# Altium footprint library UCP.PcbLib: 222 footprints (part 11 of 14)
Each footprint in its own frame and in the unit in brackets; x right, y up, seen from the top. Pads: shape width x height; smd on the part's side, far side on the other; paste and mask are expansions set on the pad; w line width, h text height; cw(c..) or ccw(c..) is an arc to the next point about the centre after c.
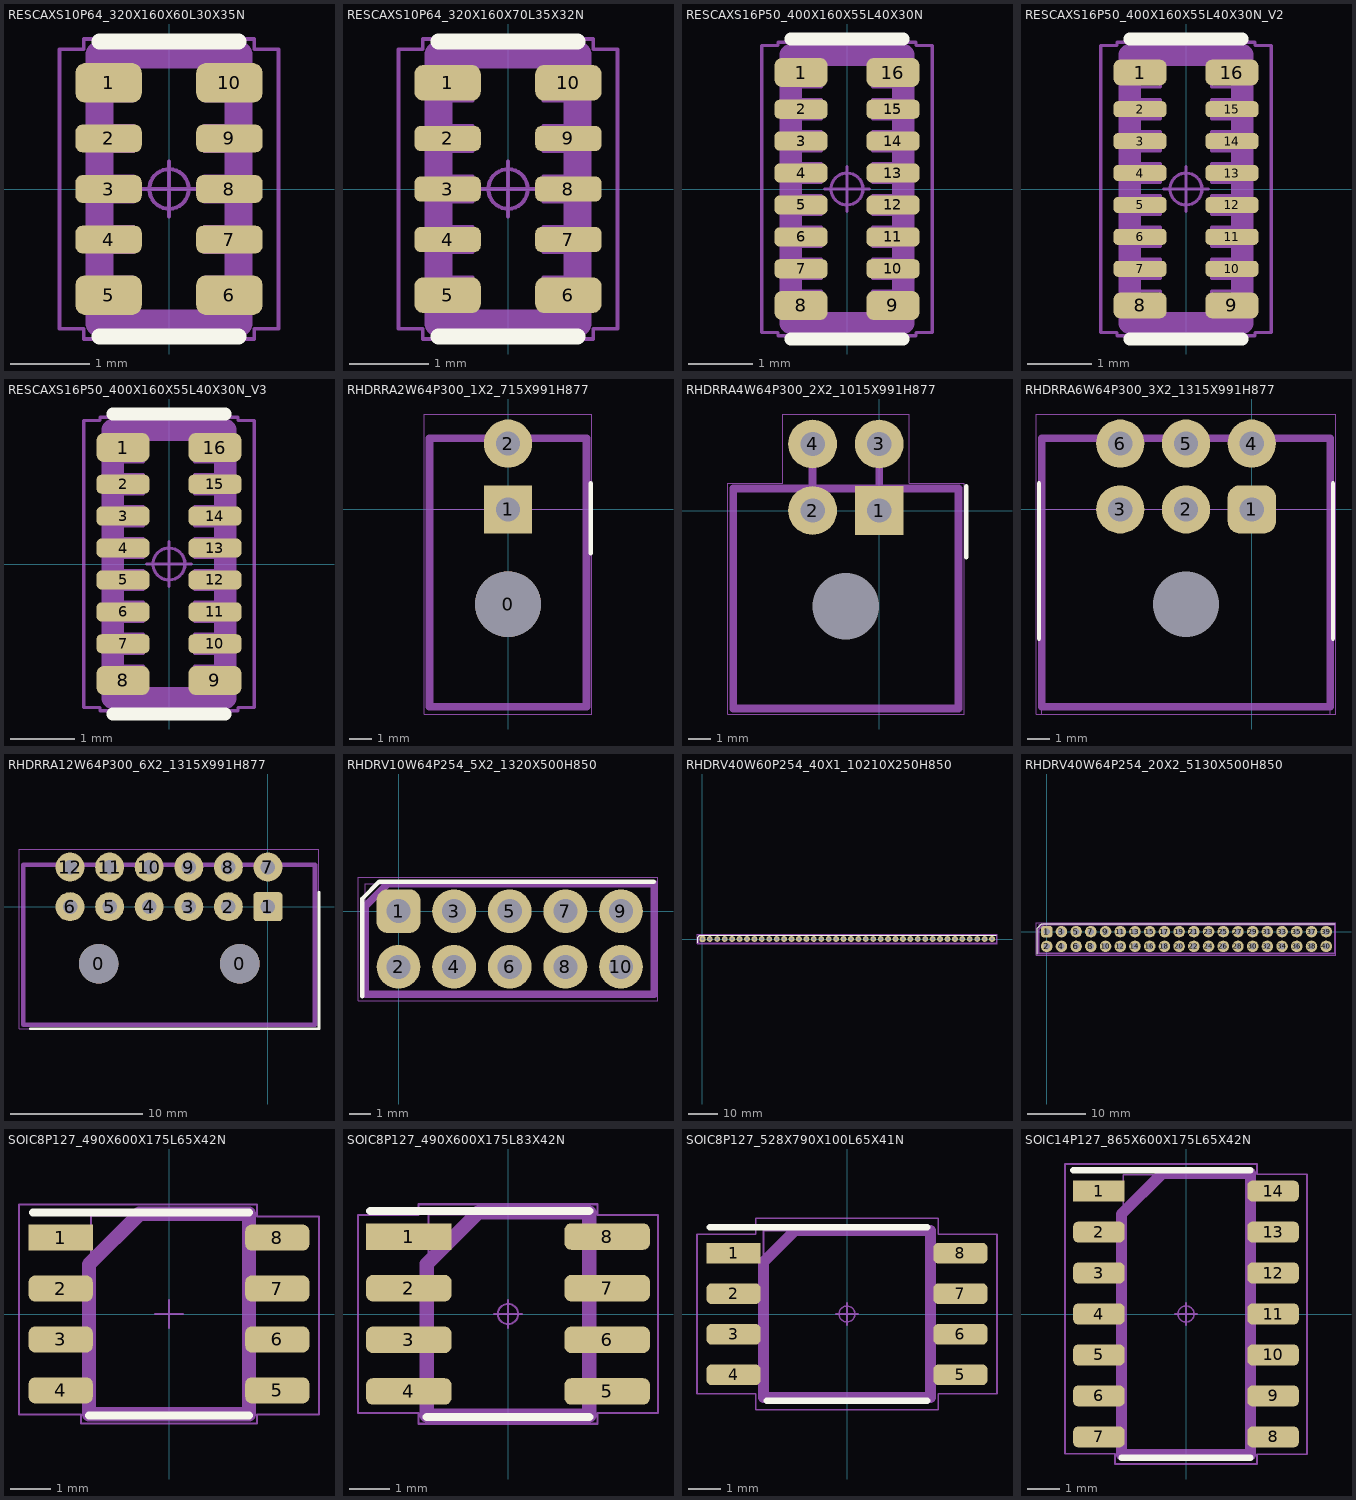
[diagram p10: the footprints below, top view; thin cyan lines are the x and y axes]

## RESCAXS10P64_320X160X60L30X35N [mm] "Resistor, Chip Array, 2 Side Convex, 0.64 mm pitch; 10 pin, 3.20 mm L X 1.60 mm W X 0.50 mm H body"
height 0.6
pads (10):
  rrect49% 0.84x0.5 smd: 1(-0.765,1.345) 5(-0.765,-1.345) 6(0.765,-1.345) 10(0.765,1.345)
  rrect50% 0.84x0.35 smd: 2(-0.765,0.64) 3(-0.765,0) 4(-0.765,-0.64) 7(0.765,-0.64) 8(0.765,0) 9(0.765,0.64)
Top Overlay:
  lines w0.2: -0.88,-1.87 0.88,-1.87 ; -0.88,1.87 0.88,1.87
Top Designator:
  text ".Designator" at 0,0 h1.2
Top Assembly:
  lines w0.35: -0.88,-1.7 -0.88,1.7 0.88,1.7 0.88,-1.7 -0.88,-1.7
Top Courtyard:
  circle w0.05: c0,0 r0.25
  lines w0.05: -0.35,0 0.35,0 ; 0,-0.35 0,0.35 ; -1.385,-1.77 -1.385,1.77 -1.08,1.77 -1.08,1.9 1.08,1.9 1.08,1.77 1.385,1.77 1.385,-1.77 1.08,-1.77 1.08,-1.9 -1.08,-1.9 -1.08,-1.77 -1.385,-1.77
Top Component Outline:
  lines w0.05: -0.8,-1.6 -0.8,1.6 0.8,1.6 0.8,-1.6 -0.8,-1.6
Top Component Terminal:
  lines w0.05: -0.8,-1.57 -0.45,-1.57 -0.45,-1.12 -0.8,-1.12 -0.8,-1.57 ; -0.8,-0.8 -0.45,-0.8 -0.45,-0.48 -0.8,-0.48 -0.8,-0.8 ; -0.8,-0.16 -0.45,-0.16 -0.45,0.16 -0.8,0.16 -0.8,-0.16 ; -0.8,0.48 -0.45,0.48 -0.45,0.8 -0.8,0.8 -0.8,0.48 ; -0.8,1.12 -0.45,1.12 -0.45,1.57 -0.8,1.57 -0.8,1.12 ; 0.45,-1.57 0.45,-1.12 0.8,-1.12 0.8,-1.57 0.45,-1.57 ; 0.45,-0.8 0.45,-0.48 0.8,-0.48 0.8,-0.8 0.45,-0.8 ; 0.45,-0.16 0.45,0.16 0.8,0.16 0.8,-0.16 0.45,-0.16 ; 0.45,0.48 0.45,0.8 0.8,0.8 0.8,0.48 0.45,0.48 ; 0.45,1.12 0.45,1.57 0.8,1.57 0.8,1.12 0.45,1.12
3D body "RESCAXS10P64_320X160X70L35X32.STEP": height 0.7, standoff 0, extent -0.85,-1.6 0.85,1.6

## RESCAXS10P64_320X160X70L35X32N [mm] "Resistor, Chip Array, 2 Side Convex, 0.64 mm pitch; 10 pin, 3.20 mm L X 1.60 mm W X 0.70 mm H body"
height 0.7
pads (10):
  rrect49% 0.84x0.45 smd: 1(-0.765,1.345) 5(-0.765,-1.345) 6(0.765,-1.345) 10(0.765,1.345)
  rrect50% 0.84x0.32 smd: 2(-0.765,0.64) 3(-0.765,0) 4(-0.765,-0.64) 7(0.765,-0.64) 8(0.765,0) 9(0.765,0.64)
Top Overlay:
  lines w0.2: -0.88,-1.87 0.88,-1.87 ; -0.88,1.87 0.88,1.87
Top Designator:
  text ".Designator" at 0,0 h1.2
Top Assembly:
  lines w0.35: -0.88,-1.7 0.88,-1.7 0.88,1.7 -0.88,1.7 -0.88,-1.7
Top Courtyard:
  circle w0.05: c0,0 r0.25
  lines w0.05: -0.35,0 0.35,0 ; 0,-0.35 0,0.35 ; -1.385,-1.77 -1.08,-1.77 -1.08,-1.9 1.08,-1.9 1.08,-1.77 1.385,-1.77 1.385,1.77 1.08,1.77 1.08,1.9 -1.08,1.9 -1.08,1.77 -1.385,1.77 -1.385,-1.77
Top Component Outline:
  lines w0.05: -0.8,-1.6 0.8,-1.6 0.8,1.6 -0.8,1.6 -0.8,-1.6
Top Component Terminal:
  lines w0.05: -0.8,-1.57 -0.8,-1.12 -0.45,-1.12 -0.45,-1.57 -0.8,-1.57 ; -0.8,-0.8 -0.8,-0.48 -0.45,-0.48 -0.45,-0.8 -0.8,-0.8 ; -0.8,-0.16 -0.8,0.16 -0.45,0.16 -0.45,-0.16 -0.8,-0.16 ; -0.8,0.48 -0.8,0.8 -0.45,0.8 -0.45,0.48 -0.8,0.48 ; -0.8,1.12 -0.8,1.57 -0.45,1.57 -0.45,1.12 -0.8,1.12 ; 0.45,-1.57 0.8,-1.57 0.8,-1.12 0.45,-1.12 0.45,-1.57 ; 0.45,-0.8 0.8,-0.8 0.8,-0.48 0.45,-0.48 0.45,-0.8 ; 0.45,-0.16 0.8,-0.16 0.8,0.16 0.45,0.16 0.45,-0.16 ; 0.45,0.48 0.8,0.48 0.8,0.8 0.45,0.8 0.45,0.48 ; 0.45,1.12 0.8,1.12 0.8,1.57 0.45,1.57 0.45,1.12
3D body "RESCAXS10P64_320X160X70L35X32.STEP": height 0.7, standoff 0, extent -0.85,-1.6 0.85,1.6

## RESCAXS16P50_400X160X55L40X30N [mm] "Resistor, Chip Array, 2 Side Convex, 0.50 mm pitch; 16 pin, 4.00 mm L X 1.60 mm W X 0.55 mm H body"
height 0.55
pads (16):
  rrect49% 0.83x0.45 smd mask+0: 1(-0.72,1.825) 8(-0.72,-1.825) 9(0.72,-1.825) 16(0.72,1.825)
  rrect53% 0.83x0.3 smd mask+0: 2(-0.72,1.25) 3(-0.72,0.75) 4(-0.72,0.25) 5(-0.72,-0.25) 6(-0.72,-0.75) 7(-0.72,-1.25) 10(0.72,-1.25) 11(0.72,-0.75) 12(0.72,-0.25) 13(0.72,0.25) 14(0.72,0.75) 15(0.72,1.25)
Top Overlay:
  lines w0.2: -0.88,-2.35 0.88,-2.35 ; -0.88,2.35 0.88,2.35
Top Solder:
  region: 1.05,2.1 0.4,2.1 0.37,2.1 0.315,2.077 0.273,2.035 0.25,1.98 0.25,1.95 0.25,-1.95 0.25,-1.98 0.273,-2.035 0.315,-2.077 0.37,-2.1 0.4,-2.1 1.05,-2.1 1.08,-2.1 1.135,-2.077 1.177,-2.035 1.2,-1.98 1.2,-1.95 1.2,1.95 1.2,1.98 1.177,2.035 1.135,2.077 1.08,2.1
  region: -1.05,2.1 -0.4,2.1 -0.37,2.1 -0.315,2.077 -0.273,2.035 -0.25,1.98 -0.25,1.95 -0.25,-1.95 -0.25,-1.98 -0.273,-2.035 -0.315,-2.077 -0.37,-2.1 -0.4,-2.1 -1.05,-2.1 -1.08,-2.1 -1.135,-2.077 -1.177,-2.035 -1.2,-1.98 -1.2,-1.95 -1.2,1.95 -1.2,1.98 -1.177,2.035 -1.135,2.077 -1.08,2.1
Top Designator:
  text ".Designator" at 0,0 h1.2
Top Assembly:
  lines w0.35: -0.88,-2.1 -0.88,2.1 0.88,2.1 0.88,-2.1 -0.88,-2.1
Top Courtyard:
  circle w0.05: c0,0 r0.25
  lines w0.05: -0.35,0 0.35,0 ; 0,-0.35 0,0.35 ; -1.335,-2.25 -1.335,2.25 -1.08,2.25 -1.08,2.3 1.08,2.3 1.08,2.25 1.335,2.25 1.335,-2.25 1.08,-2.25 1.08,-2.3 -1.08,-2.3 -1.08,-2.25 -1.335,-2.25
Top Component Outline:
  lines w0.05: -0.8,-2 -0.8,2 0.8,2 0.8,-2 -0.8,-2
Top Component Terminal:
  lines w0.05: -0.8,-2.05 -0.4,-2.05 -0.4,-1.6 -0.8,-1.6 -0.8,-2.05 ; -0.8,-1.4 -0.4,-1.4 -0.4,-1.1 -0.8,-1.1 -0.8,-1.4 ; -0.8,-0.9 -0.4,-0.9 -0.4,-0.6 -0.8,-0.6 -0.8,-0.9 ; -0.8,-0.4 -0.4,-0.4 -0.4,-0.1 -0.8,-0.1 -0.8,-0.4 ; -0.8,0.1 -0.4,0.1 -0.4,0.4 -0.8,0.4 -0.8,0.1 ; -0.8,0.6 -0.4,0.6 -0.4,0.9 -0.8,0.9 -0.8,0.6 ; -0.8,1.1 -0.4,1.1 -0.4,1.4 -0.8,1.4 -0.8,1.1 ; -0.8,1.6 -0.4,1.6 -0.4,2.05 -0.8,2.05 -0.8,1.6 ; 0.4,-2.05 0.4,-1.6 0.8,-1.6 0.8,-2.05 0.4,-2.05 ; 0.4,-1.4 0.4,-1.1 0.8,-1.1 0.8,-1.4 0.4,-1.4 ; 0.4,-0.9 0.4,-0.6 0.8,-0.6 0.8,-0.9 0.4,-0.9 ; 0.4,-0.4 0.4,-0.1 0.8,-0.1 0.8,-0.4 0.4,-0.4 ; 0.4,0.1 0.4,0.4 0.8,0.4 0.8,0.1 0.4,0.1 ; 0.4,0.6 0.4,0.9 0.8,0.9 0.8,0.6 0.4,0.6 ; 0.4,1.1 0.4,1.4 0.8,1.4 0.8,1.1 0.4,1.1 ; 0.4,1.6 0.4,2.05 0.8,2.05 0.8,1.6 0.4,1.6
3D body "RESCAXS16P50_400X160X55L40X30.STEP": height 0.55, standoff 0, extent -0.85,-2.05 0.85,2.05

## RESCAXS16P50_400X160X55L40X30N_V2 [mm] "Resistor, Chip Array, 2 Side Convex, 0.50 mm pitch; 16 pin, 4.00 mm L X 1.60 mm W X 0.55 mm H body"
height 0.55
pads (16):
  rrect49% 0.83x0.4 smd mask+0.05: 1(-0.72,1.825) 8(-0.72,-1.825) 9(0.72,-1.825) 16(0.72,1.825)
  rrect53% 0.83x0.25 smd mask+0.05: 2(-0.72,1.25) 3(-0.72,0.75) 4(-0.72,0.25) 5(-0.72,-0.25) 6(-0.72,-0.75) 7(-0.72,-1.25) 10(0.72,-1.25) 11(0.72,-0.75) 12(0.72,-0.25) 13(0.72,0.25) 14(0.72,0.75) 15(0.72,1.25)
Top Overlay:
  lines w0.2: -0.88,-2.35 0.88,-2.35 ; -0.88,2.35 0.88,2.35
Top Designator:
  text ".Designator" at 0,0 h1.2
Top Assembly:
  lines w0.35: -0.88,-2.1 -0.88,2.1 0.88,2.1 0.88,-2.1 -0.88,-2.1
Top Courtyard:
  circle w0.05: c0,0 r0.25
  lines w0.05: -0.35,0 0.35,0 ; 0,-0.35 0,0.35 ; -1.335,-2.25 -1.335,2.25 -1.08,2.25 -1.08,2.3 1.08,2.3 1.08,2.25 1.335,2.25 1.335,-2.25 1.08,-2.25 1.08,-2.3 -1.08,-2.3 -1.08,-2.25 -1.335,-2.25
Top Component Outline:
  lines w0.05: -0.8,-2 -0.8,2 0.8,2 0.8,-2 -0.8,-2
Top Component Terminal:
  lines w0.05: -0.8,-2.05 -0.4,-2.05 -0.4,-1.6 -0.8,-1.6 -0.8,-2.05 ; -0.8,-1.4 -0.4,-1.4 -0.4,-1.1 -0.8,-1.1 -0.8,-1.4 ; -0.8,-0.9 -0.4,-0.9 -0.4,-0.6 -0.8,-0.6 -0.8,-0.9 ; -0.8,-0.4 -0.4,-0.4 -0.4,-0.1 -0.8,-0.1 -0.8,-0.4 ; -0.8,0.1 -0.4,0.1 -0.4,0.4 -0.8,0.4 -0.8,0.1 ; -0.8,0.6 -0.4,0.6 -0.4,0.9 -0.8,0.9 -0.8,0.6 ; -0.8,1.1 -0.4,1.1 -0.4,1.4 -0.8,1.4 -0.8,1.1 ; -0.8,1.6 -0.4,1.6 -0.4,2.05 -0.8,2.05 -0.8,1.6 ; 0.4,-2.05 0.4,-1.6 0.8,-1.6 0.8,-2.05 0.4,-2.05 ; 0.4,-1.4 0.4,-1.1 0.8,-1.1 0.8,-1.4 0.4,-1.4 ; 0.4,-0.9 0.4,-0.6 0.8,-0.6 0.8,-0.9 0.4,-0.9 ; 0.4,-0.4 0.4,-0.1 0.8,-0.1 0.8,-0.4 0.4,-0.4 ; 0.4,0.1 0.4,0.4 0.8,0.4 0.8,0.1 0.4,0.1 ; 0.4,0.6 0.4,0.9 0.8,0.9 0.8,0.6 0.4,0.6 ; 0.4,1.1 0.4,1.4 0.8,1.4 0.8,1.1 0.4,1.1 ; 0.4,1.6 0.4,2.05 0.8,2.05 0.8,1.6 0.4,1.6
3D body "RESCAXS16P50_400X160X55L40X30.STEP": height 0.55, standoff 0, extent -0.85,-2.05 0.85,2.05

## RESCAXS16P50_400X160X55L40X30N_V3 [mm] "Resistor, Chip Array, 2 Side Convex, 0.50 mm pitch; 16 pin, 4.00 mm L X 1.60 mm W X 0.55 mm H body"
height 0.55
pads (16):
  rrect49% 0.83x0.45 smd mask+0.05: 1(-0.72,1.825) 8(-0.72,-1.825) 9(0.72,-1.825) 16(0.72,1.825)
  rrect53% 0.83x0.3 smd mask+0.05: 2(-0.72,1.25) 3(-0.72,0.75) 4(-0.72,0.25) 5(-0.72,-0.25) 6(-0.72,-0.75) 7(-0.72,-1.25) 10(0.72,-1.25) 11(0.72,-0.75) 12(0.72,-0.25) 13(0.72,0.25) 14(0.72,0.75) 15(0.72,1.25)
Top Overlay:
  lines w0.2: -0.88,-2.35 0.88,-2.35 ; -0.88,2.35 0.88,2.35
Top Designator:
  text ".Designator" at 0,0 h1.2
Top Assembly:
  lines w0.35: -0.88,-2.1 -0.88,2.1 0.88,2.1 0.88,-2.1 -0.88,-2.1
Top Courtyard:
  circle w0.05: c0,0 r0.25
  lines w0.05: -0.35,0 0.35,0 ; 0,-0.35 0,0.35 ; -1.335,-2.25 -1.335,2.25 -1.08,2.25 -1.08,2.3 1.08,2.3 1.08,2.25 1.335,2.25 1.335,-2.25 1.08,-2.25 1.08,-2.3 -1.08,-2.3 -1.08,-2.25 -1.335,-2.25
Top Component Outline:
  lines w0.05: -0.8,-2 -0.8,2 0.8,2 0.8,-2 -0.8,-2
Top Component Terminal:
  lines w0.05: -0.8,-2.05 -0.4,-2.05 -0.4,-1.6 -0.8,-1.6 -0.8,-2.05 ; -0.8,-1.4 -0.4,-1.4 -0.4,-1.1 -0.8,-1.1 -0.8,-1.4 ; -0.8,-0.9 -0.4,-0.9 -0.4,-0.6 -0.8,-0.6 -0.8,-0.9 ; -0.8,-0.4 -0.4,-0.4 -0.4,-0.1 -0.8,-0.1 -0.8,-0.4 ; -0.8,0.1 -0.4,0.1 -0.4,0.4 -0.8,0.4 -0.8,0.1 ; -0.8,0.6 -0.4,0.6 -0.4,0.9 -0.8,0.9 -0.8,0.6 ; -0.8,1.1 -0.4,1.1 -0.4,1.4 -0.8,1.4 -0.8,1.1 ; -0.8,1.6 -0.4,1.6 -0.4,2.05 -0.8,2.05 -0.8,1.6 ; 0.4,-2.05 0.4,-1.6 0.8,-1.6 0.8,-2.05 0.4,-2.05 ; 0.4,-1.4 0.4,-1.1 0.8,-1.1 0.8,-1.4 0.4,-1.4 ; 0.4,-0.9 0.4,-0.6 0.8,-0.6 0.8,-0.9 0.4,-0.9 ; 0.4,-0.4 0.4,-0.1 0.8,-0.1 0.8,-0.4 0.4,-0.4 ; 0.4,0.1 0.4,0.4 0.8,0.4 0.8,0.1 0.4,0.1 ; 0.4,0.6 0.4,0.9 0.8,0.9 0.8,0.6 0.4,0.6 ; 0.4,1.1 0.4,1.4 0.8,1.4 0.8,1.1 0.4,1.1 ; 0.4,1.6 0.4,2.05 0.8,2.05 0.8,1.6 0.4,1.6
3D body "RESCAXS16P50_400X160X55L40X30.STEP": height 0.55, standoff 0, extent -0.85,-2.05 0.85,2.05

## RHDRRA2W64P300_1X2_715X991H877 [mm] "Header, Right Angle Receptacle, 3.00 mm pitch; 0.64 mm lead width, 2 pins, 2 rows, 1 pins per row, 7.15mm L X 9.91 mm W X 8.77 mm H body"
height 8.77
pads (3):
  round 3 hole 3 unplated mask+0.25: 0(0,-4.32)
  rect 2.2x2.2 / inner round 2.2 / far side round 2.2 hole 1.1 paste-2.2: 1(0,0)
  round 2.2 hole 1.1 paste-2.2: 2(0,3)
Top Overlay:
  lines w0.2: 3.775,-2 3.775,1.2
Top Designator:
  text ".Designator" at 0,0 h1.2
Top Assembly:
  lines w0.35: -3.575,-9 -3.575,3.25 3.575,3.25 3.575,-9 -3.575,-9
Top Courtyard:
  lines w0.05: -3.825,-9.325 3.825,-9.325 3.825,4.35 -3.825,4.35 -3.825,-9.325
Top Component Outline:
  lines w0.05: -3.575,-9 3.575,-9 3.575,0 -3.575,0 -3.575,-9
Top Component Terminal:
  lines w0.05: -0.32,-0.32 -0.32,0.32 0.32,0.32 0.32,-0.32 -0.32,-0.32 ; -0.32,2.68 -0.32,3.32 0.32,3.32 0.32,2.68 -0.32,2.68
3D body "43045-0200_PA.stp": height 8.77, standoff -3.18, extent -3.575,-8.92 3.575,3.32

## RHDRRA4W64P300_2X2_1015X991H877 [mm] "Header, Right Angle Receptacle, 3.00 mm pitch; 0.64 mm lead width, 4 pins, 2 rows, 2 pins per row, 7.15mm L X 9.91 mm W X 8.77 mm H body"
height 8.77
pads (5):
  round 0 hole 3 unplated mask+0.25: 0(-1.5,-4.32)
  rect 2.2x2.2 / inner round 2.2 / far side round 2.2 hole 1.1 paste-2.2: 1(0,0)
  round 2.2 hole 1.1 paste-2.2: 2(-3,0) 3(0,3) 4(-3,3)
Top Overlay:
  lines w0.2: 3.925,-2.1 3.925,1.1
Top Designator:
  text ".Designator" at 0,0 h1.2
Top Assembly:
  lines w0.35: -3,0.99 -3,3 ; 0,0.99 0,3 ; -6.575,-8.92 3.575,-8.92 3.575,0.99 -6.575,0.99 -6.575,-8.92
Top Courtyard:
  lines w0.05: -4.35,4.346 -4.35,1.24 -6.825,1.24 -6.825,-9.17 3.825,-9.17 3.825,1.24 1.35,1.24 1.35,4.346 ; -4.35,4.35 1.346,4.35
Top Component Outline:
  lines w0.05: -6.575,-8.92 -6.575,0.99 3.575,0.99 3.575,-8.92 2.075,-8.92 -6.575,-8.92
Top Component Terminal:
  lines w0.05: -3.32,-0.32 -2.68,-0.32 -2.68,0.32 -3.32,0.32 -3.32,-0.32 ; -3.32,2.68 -2.68,2.68 -2.68,3.32 -3.32,3.32 -3.32,2.68 ; -0.32,-0.32 0.32,-0.32 0.32,0.32 -0.32,0.32 -0.32,-0.32 ; -0.32,2.68 0.32,2.68 0.32,3.32 -0.32,3.32 -0.32,2.68
3D body "RHDRRA4W64P300_2X2_1015X991H877.stp": height 8.77, standoff -3.18, extent -6.575,-8.92 3.575,3.32

## RHDRRA6W64P300_3X2_1315X991H877 [mm] "Header, Right Angle Receptacle, 3.00 mm pitch; 0.64 mm lead width, 6 pins, 2 rows, 3 pins per row, 13.15 mm L X 9.91 mm W X 8.77 mm H body"
height 8.77
pads (7):
  round 0 hole 3 unplated mask+0.25: 0(-3,-4.32)
  rrect50% 2.2x2.2 hole 1.1 paste-2.2: 1(0,0)
  round 2.2 hole 1.1 paste-2.2: 2(-3,0) 3(-6,0) 4(0,3) 5(-3,3) 6(-6,3)
Top Overlay:
  lines w0.2: -9.7,-5.9 -9.7,1.2 ; 3.7,-5.9 3.7,1.2
Top Designator:
  text ".Designator" at 0,0 h1.2
Top Assembly:
  lines w0.35: -9.58,-9 3.58,-9 3.58,3.25 -9.58,3.25 -9.58,-9
Top Courtyard:
  circle w0.05: c0,0 r0.25
  lines w0.05: -0.35,0 0.35,0 ; 0,-0.35 0,0.35 ; -9.83,-9.325 3.83,-9.325 3.83,4.35 -9.83,4.35 -9.83,-9.325
Top Component Outline:
  lines w0.05: -9.575,-9.325 3.575,-9.325 3.575,0 -9.575,0 -9.575,-9.325
Top Component Terminal:
  lines w0.05: -6.32,-0.32 -5.68,-0.32 -5.68,0.32 -6.32,0.32 -6.32,-0.32 ; -6.32,2.68 -5.68,2.68 -5.68,3.32 -6.32,3.32 -6.32,2.68 ; -3.32,-0.32 -2.68,-0.32 -2.68,0.32 -3.32,0.32 -3.32,-0.32 ; -3.32,2.68 -2.68,2.68 -2.68,3.32 -3.32,3.32 -3.32,2.68 ; -0.32,-0.32 0.32,-0.32 0.32,0.32 -0.32,0.32 -0.32,-0.32 ; -0.32,2.68 0.32,2.68 0.32,3.32 -0.32,3.32 -0.32,2.68
3D body "MOLEX_430450600.stp": height 8.77, standoff -3.18, extent -9.575,-8.92 3.575,3.32

## RHDRRA12W64P300_6X2_1315X991H877 [mm] "Header, Right Angle Receptacle, 3.00 mm pitch; 0.64 mm lead width, 12 pins, 2 rows, 6 pins per row, 13.15 mm L X 9.91 mm W X 8.77 mm H body"
height 8.77
pads (14):
  round 3 hole 3 unplated mask+0.25: 0(-12.84,-4.32) 0(-2.14,-4.32)
  rrect23% 2.2x2.2 / inner round 2.2 / far side rrect23% 2.2x2.2 hole 1.1 paste-2.2: 1(0,0)
  round 2.2 hole 1.1 paste-2.2: 2(-3,0) 3(-6,0) 4(-9,0) 5(-12,0) 6(-15,0) 7(0,3) 8(-3,3) 9(-6,3) 10(-9,3) 11(-12,3) 12(-15,3)
Top Overlay:
  lines w0.2: -18,-9.25 3.875,-9.25 3.875,1.099
Top Designator:
  text ".Designator" at 0,0 h1.2
Top Assembly:
  lines w0.35: -18.55,-8.95 3.575,-8.95 3.575,3.175 -18.55,3.175 -18.55,-8.95
Top Courtyard:
  circle w0.05: c0,0 r0.25
  lines w0.05: -0.35,0 0.35,0 ; 0,-0.35 0,0.35 ; -18.875,-9.25 3.875,-9.25 3.875,4.35 -18.875,4.35 -18.875,-9.25
Top Component Outline:
  lines w0.05: -18.875,-9.25 3.875,-9.25 3.875,4.35 -18.875,4.35 -18.875,-9.25
Top Component Terminal:
  lines w0.05: -15.32,-0.32 -14.68,-0.32 -14.68,0.32 -15.32,0.32 -15.32,-0.32 ; -15.32,2.68 -14.68,2.68 -14.68,3.32 -15.32,3.32 -15.32,2.68 ; -12.32,-0.32 -11.68,-0.32 -11.68,0.32 -12.32,0.32 -12.32,-0.32 ; -12.32,2.68 -11.68,2.68 -11.68,3.32 -12.32,3.32 -12.32,2.68 ; -9.32,-0.32 -8.68,-0.32 -8.68,0.32 -9.32,0.32 -9.32,-0.32 ; -9.32,2.68 -8.68,2.68 -8.68,3.32 -9.32,3.32 -9.32,2.68 ; -6.32,-0.32 -5.68,-0.32 -5.68,0.32 -6.32,0.32 -6.32,-0.32 ; -6.32,2.68 -5.68,2.68 -5.68,3.32 -6.32,3.32 -6.32,2.68 ; -3.32,-0.32 -2.68,-0.32 -2.68,0.32 -3.32,0.32 -3.32,-0.32 ; -3.32,2.68 -2.68,2.68 -2.68,3.32 -3.32,3.32 -3.32,2.68 ; -0.32,-0.32 0.32,-0.32 0.32,0.32 -0.32,0.32 -0.32,-0.32 ; -0.32,2.68 0.32,2.68 0.32,3.32 -0.32,3.32 -0.32,2.68
3D body "430451200.stp": height 8.83, standoff -3.12, extent -18.575,-8.955 3.575,3.285

## RHDRV10W64P254_5X2_1320X500H850 [mm] "Header, Vertical Receptacle, 2.54 mm pitch; 0.64 mm lead width, 10 pins, 2 row, 5 pins per row, 13.20 mm L X 5.00 mm W X 8.50 mm H body"
height 8.5
pads (10):
  rrect50% 2x2 hole 1.1 paste-1.65: 1(0,0)
  round 2 hole 1.1 paste-1.65: 2(0,-2.54) 3(2.54,0) 4(2.54,-2.54) 5(5.08,0) 6(5.08,-2.54) 7(7.62,0) 8(7.62,-2.54) 9(10.16,0) 10(10.16,-2.54)
Top Overlay:
  lines w0.2: -1.65,-3.89 -1.65,0.575 -0.875,1.35 11.65,1.35
Top Designator:
  text ".Designator" at -4.511,-0.453 h2
Top Assembly:
  lines w0.35: -1.52,-3.79 11.68,-3.79 11.68,1.25 -0.5,1.25 -1.52,0.23 -1.52,-3.79
Top Courtyard:
  lines w0.05: -0.35,0 0.35,0 ; 0,-0.35 0,0.35 ; -1.85,-4.09 11.85,-4.09 11.85,1.55 -1.85,1.55 -1.85,-4.09
Top Component Outline:
  lines w0.025: -1.52,-3.79 -1.52,-0.28 -1.52,1.25 -1.25,1.25 11.68,1.25 11.68,-3.79 -1.25,-3.79 -1.52,-3.79
Top Component Terminal:
  lines w0.025: -0.3,-2.74 -0.3,-2.34 0.3,-2.34 0.3,-2.74 -0.3,-2.74 ; -0.3,-0.2 -0.3,0.2 0.3,0.2 0.3,-0.2 -0.3,-0.2 ; 2.24,-2.74 2.24,-2.34 2.84,-2.34 2.84,-2.74 2.24,-2.74 ; 2.24,-0.2 2.24,0.2 2.84,0.2 2.84,-0.2 2.24,-0.2 ; 4.78,-2.74 4.78,-2.34 5.38,-2.34 5.38,-2.74 4.78,-2.74 ; 4.78,-0.2 4.78,0.2 5.38,0.2 5.38,-0.2 4.78,-0.2 ; 7.32,-2.74 7.32,-2.34 7.92,-2.34 7.92,-2.74 7.32,-2.74 ; 7.32,-0.2 7.32,0.2 7.92,0.2 7.92,-0.2 7.32,-0.2 ; 9.86,-2.74 9.86,-2.34 10.46,-2.34 10.46,-2.74 9.86,-2.74 ; 9.86,-0.2 9.86,0.2 10.46,0.2 10.46,-0.2 9.86,-0.2
3D body "RHDRV10W64P254_5X2_1320X500H850.stp": height 8.5, standoff -3, extent -1.52,-3.75 11.68,1.25

## RHDRV40W60P254_40X1_10210X250H850 [mm] "Header, Vertical Receptacle, 2.54 mm pitch; 0.60 mm lead width, 40 pins, 1 row, 40 pins per row, 102.10 mm L X 2.50 mm W X 8.50 mm H body"
height 8.5
pads (40):
  rrect50% 2x2 hole 1.1 paste-1.65: 1(0,0)
  round 2 hole 1.1 paste-1.65: 2(2.54,0) 3(5.08,0) 4(7.62,0) 5(10.16,0) 6(12.7,0) 7(15.24,0) 8(17.78,0) 9(20.32,0) 10(22.86,0) 11(25.4,0) 12(27.94,0) 13(30.48,0) 14(33.02,0) 15(35.56,0) 16(38.1,0) 17(40.64,0) 18(43.18,0) 19(45.72,0) 20(48.26,0) 21(50.8,0) 22(53.34,0) 23(55.88,0) 24(58.42,0) 25(60.96,0) 26(63.5,0) 27(66.04,0) 28(68.58,0) 29(71.12,0) 30(73.66,0) 31(76.2,0) 32(78.74,0) 33(81.28,0) 34(83.82,0) 35(86.36,0) 36(88.9,0) 37(91.44,0) 38(93.98,0) 39(96.52,0) 40(99.06,0)
Top Overlay:
  lines w0.2: -1.65,-1.35 -1.65,0.575 -0.875,1.35 100.55,1.35
Top Designator:
  text ".Designator" at -4.511,-0.453 h2
Top Assembly:
  lines w0.35: -1.52,-1.25 100.58,-1.25 100.58,1.25 -0.5,1.25 -1.52,0.23 -1.52,-1.25
Top Courtyard:
  lines w0.05: -0.35,0 0.35,0 ; 0,-0.35 0,0.35 ; -1.85,-1.55 100.75,-1.55 100.75,1.55 -1.85,1.55 -1.85,-1.55
Top Component Outline:
  lines w0.025: -1.25,-1.25 100.58,-1.25 100.58,1.25 -1.25,1.25 -1.25,-1.25
Top Component Terminal:
  drawing of 160 lines, arcs and shapes, not listed
3D body "RHDRV40W60P254_40X1_10210X250H850.stp": height 8.5, standoff -3, extent -1.52,-1.25 100.58,1.25

## RHDRV40W64P254_20X2_5130X500H850 [mm] "Header, Vertical Receptacle, 2.54 mm pitch; 0.64 mm lead width, 40 pins, 2 row, 20 pins per row, 51.30 mm L X 5.00 mm W X 8.50 mm H body"
height 8.5
pads (40):
  rrect50% 2x2 hole 1.1 paste-1.65: 1(0,0)
  round 2 hole 1.1 paste-1.65: 2(0,-2.54) 3(2.54,0) 4(2.54,-2.54) 5(5.08,0) 6(5.08,-2.54) 7(7.62,0) 8(7.62,-2.54) 9(10.16,0) 10(10.16,-2.54) 11(12.7,0) 12(12.7,-2.54) 13(15.24,0) 14(15.24,-2.54) 15(17.78,0) 16(17.78,-2.54) 17(20.32,0) 18(20.32,-2.54) 19(22.86,0) 20(22.86,-2.54) 21(25.4,0) 22(25.4,-2.54) 23(27.94,0) 24(27.94,-2.54) 25(30.48,0) 26(30.48,-2.54) 27(33.02,0) 28(33.02,-2.54) 29(35.56,0) 30(35.56,-2.54) 31(38.1,0) 32(38.1,-2.54) 33(40.64,0) 34(40.64,-2.54) 35(43.18,0) 36(43.18,-2.54) 37(45.72,0) 38(45.72,-2.54) 39(48.26,0) 40(48.26,-2.54)
Top Overlay:
  lines w0.2: -1.65,-3.89 -1.65,0.575 -0.875,1.35 49.75,1.35
Top Designator:
  text ".Designator" at -4.511,-0.453 h2
Top Assembly:
  lines w0.35: 49.78,1.25 49.78,-3.79 -1.52,-3.79 -1.52,0.23 -0.5,1.25 49.788,1.25
Top Courtyard:
  lines w0.05: -0.35,0 0.35,0 ; 0,-0.35 0,0.35 ; -1.85,-4.09 -1.85,1.55 49.95,1.55 49.95,-4.09 -1.85,-4.09
Top Component Outline:
  lines w0.025: 49.78,1.21 49.78,-3.79 -1.25,-3.79 -1.25,1.25 49.78,1.25
Top Component Terminal:
  drawing of 160 lines, arcs and shapes, not listed
3D body "RHDRV40W60P254_20X2_5130X500H850.stp": height 8.5, standoff -3, extent -1.52,-3.75 49.78,1.25

## SOIC8P127_490X600X175L65X42N [mm] "Small Outline IC (SOIC), 1.27 mm pitch; 8 pin, 4.905 mm L X 3.90 mm W X 1.75 mm H body"
height 1.75
pads (8):
  rect 1.6x0.65 smd: 1(-2.7,1.905)
  rrect49% 1.6x0.65 smd: 2(-2.7,0.635) 3(-2.7,-0.635) 4(-2.7,-1.905) 5(2.7,-1.905) 6(2.7,-0.635) 7(2.7,0.635) 8(2.7,1.905)
Top Overlay:
  lines w0.2: -3.39,2.53 -2,2.53 2,2.53 ; -2,-2.53 2,-2.53
Top Designator:
  text ".Designator" at 0,0 h1.2
Top Assembly:
  lines w0.35: -2,-2.5 -2,1.23 -0.73,2.5 2,2.5 2,-2.5 -2,-2.5
Top Courtyard:
  lines w0.05: -0.35,0 0.35,0 ; 0,-0.35 0,0.35 ; -3.74,-2.5 -3.74,2.73 2.2,2.73 2.2,2.43 3.74,2.43 3.74,-2.5 2.2,-2.5 2.2,-2.73 -2.2,-2.73 -2.2,-2.5 -3.74,-2.5
Top Component Outline:
  lines w0.05: -1.95,-2.452 -1.95,2.452 1.95,2.452 1.95,-2.452 -1.95,-2.452
Top Component Terminal:
  lines w0.05: -3,-2.115 -2.165,-2.115 -2.165,-1.695 -3,-1.695 -3,-2.115 ; -3,-0.845 -2.165,-0.845 -2.165,-0.425 -3,-0.425 -3,-0.845 ; -3,0.425 -2.165,0.425 -2.165,0.845 -3,0.845 -3,0.425 ; -3,1.695 -2.165,1.695 -2.165,2.115 -3,2.115 -3,1.695 ; 2.165,-2.115 2.165,-1.695 3,-1.695 3,-2.115 2.165,-2.115 ; 2.165,-0.845 2.165,-0.425 3,-0.425 3,-0.845 2.165,-0.845 ; 2.165,0.425 2.165,0.845 3,0.845 3,0.425 2.165,0.425 ; 2.165,1.695 2.165,2.115 3,2.115 3,1.695 2.165,1.695
3D body "SOIC8P127_490X600X175L83X42.STEP": height 1.75, standoff 0, extent -3,-2.452 3,2.452

## SOIC8P127_490X600X175L83X42N [mm] "Small Outline IC (SOIC), 1.27 mm pitch; 8 pin, 4.905 mm L X 3.90 mm W X 1.75 mm H body"
height 1.75
pads (8):
  rect 2.1x0.65 smd: 1(-2.44,1.905)
  rrect49% 2.1x0.65 smd: 2(-2.44,0.635) 3(-2.44,-0.635) 4(-2.44,-1.905) 5(2.44,-1.905) 6(2.44,-0.635) 7(2.44,0.635) 8(2.44,1.905)
Top Overlay:
  lines w0.2: -3.39,2.53 -2,2.53 2,2.53 ; -2,-2.53 2,-2.53
Top Designator:
  text ".Designator" at 0,0 h1.2
Top Assembly:
  lines w0.35: -2,-2.5 -2,1.23 -0.73,2.5 2,2.5 2,-2.5 -2,-2.5
Top Courtyard:
  circle w0.05: c0,0 r0.25
  lines w0.05: -0.35,0 0.35,0 ; 0,-0.35 0,0.35 ; -3.69,-2.43 -3.69,2.43 -2.2,2.43 -2.2,2.7 2.2,2.7 2.2,2.43 3.69,2.43 3.69,-2.43 2.2,-2.43 2.2,-2.7 -2.2,-2.7 -2.2,-2.43 -3.69,-2.43
Top Component Outline:
  lines w0.05: -1.95,-2.452 -1.95,2.452 1.95,2.452 1.95,-2.452 -1.95,-2.452
Top Component Terminal:
  lines w0.05: -3,-2.115 -2.165,-2.115 -2.165,-1.695 -3,-1.695 -3,-2.115 ; -3,-0.845 -2.165,-0.845 -2.165,-0.425 -3,-0.425 -3,-0.845 ; -3,0.425 -2.165,0.425 -2.165,0.845 -3,0.845 -3,0.425 ; -3,1.695 -2.165,1.695 -2.165,2.115 -3,2.115 -3,1.695 ; 2.165,-2.115 2.165,-1.695 3,-1.695 3,-2.115 2.165,-2.115 ; 2.165,-0.845 2.165,-0.425 3,-0.425 3,-0.845 2.165,-0.845 ; 2.165,0.425 2.165,0.845 3,0.845 3,0.425 2.165,0.425 ; 2.165,1.695 2.165,2.115 3,2.115 3,1.695 2.165,1.695
3D body "SOIC8P127_490X600X175L83X42.STEP": height 1.75, standoff 0, extent -3,-2.452 3,2.452

## SOIC8P127_528X790X100L65X41N [mm] "Small Outline IC, 1.27 mm pitch; 8 pin, 5.33 mm L X 5.33 mm W X 2.16 mm H body"
height 2.16
pads (8):
  rect 1.7x0.65 smd: 1(-3.554,1.905)
  rrect49% 1.7x0.65 smd: 2(-3.554,0.635) 3(-3.554,-0.635) 4(-3.554,-1.905) 5(3.554,-1.905) 6(3.554,-0.635) 7(3.554,0.635) 8(3.554,1.905)
Top Overlay:
  lines w0.2: -4.3,2.715 -2.515,2.715 2.515,2.715 ; -2.515,-2.715 2.515,-2.715
Top Designator:
  text ".Designator" at 0,0 h1.2
Top Assembly:
  lines w0.35: -2.615,-2.615 -2.615,1.635 -1.635,2.615 2.615,2.615 2.615,-2.615 -2.615,-2.615
Top Courtyard:
  circle w0.05: c0,0 r0.25
  lines w0.05: -0.35,0 0.35,0 ; 0,-0.35 0,0.35 ; -4.7,-2.5 -2.865,-2.5 -2.865,-3 2.865,-3 2.865,-2.5 4.7,-2.5 4.7,2.5 2.865,2.5 2.865,3 -2.865,3 -2.865,2.5 -4.7,2.5 -4.7,-2.5
Top Component Outline:
  lines w0.05: -2.615,2.615 -2.615,-2.615 2.615,-2.615 2.615,2.615 ; -2.615,2.618 2.615,2.618
Top Component Terminal:
  lines w0.05: -3.95,-2.115 -3.3,-2.115 -3.3,-1.695 -3.95,-1.695 -3.95,-2.115 ; -3.95,-0.845 -3.3,-0.845 -3.3,-0.425 -3.95,-0.425 -3.95,-0.845 ; -3.95,0.425 -3.3,0.425 -3.3,0.845 -3.95,0.845 -3.95,0.425 ; -3.95,1.695 -3.3,1.695 -3.3,2.115 -3.95,2.115 -3.95,1.695 ; 3.3,-2.115 3.3,-1.695 3.95,-1.695 3.95,-2.115 3.3,-2.115 ; 3.3,-0.845 3.3,-0.425 3.95,-0.425 3.95,-0.845 3.3,-0.845 ; 3.3,0.425 3.3,0.845 3.95,0.845 3.95,0.425 3.3,0.425 ; 3.3,1.695 3.3,2.115 3.95,2.115 3.95,1.695 3.3,1.695
3D body "SOIC8P127_528X790X100L65X41N.stp": height 2.16, standoff 0, extent -3.95,-2.615 3.95,2.615

## SOIC14P127_865X600X175L65X42N [mm] "Small Outline IC (SOIC), 1.27 mm pitch; 14 pin, 8.65 mm L X 3.90 mm W X 1.75 mm H body"
height 1.75
pads (14):
  rect 1.6x0.65 smd: 1(-2.7,3.81)
  rrect49% 1.6x0.65 smd: 2(-2.7,2.54) 3(-2.7,1.27) 4(-2.7,0) 5(-2.7,-1.27) 6(-2.7,-2.54) 7(-2.7,-3.81) 8(2.7,-3.81) 9(2.7,-2.54) 10(2.7,-1.27) 11(2.7,0) 12(2.7,1.27) 13(2.7,2.54) 14(2.7,3.81)
Top Overlay:
  lines w0.2: -3.5,4.45 -2,4.45 2,4.45 ; -2,-4.45 2,-4.45
Top Designator:
  text ".Designator" at -4.511,-0.453 h2
Top Assembly:
  lines w0.35: -2,-4.365 2,-4.365 2,4.365 -0.73,4.365 -2,3.095 -2,-4.365
Top Courtyard:
  circle w0.05: c0,0 r0.25
  lines w0.05: -0.35,0 0.35,0 ; 0,-0.35 0,0.35 ; -3.75,-4.335 -2.2,-4.335 -2.2,-4.65 2.2,-4.65 2.2,-4.35 3.75,-4.35 3.75,4.335 2.2,4.335 2.2,4.65 -2.2,4.65 -3.75,4.65 -3.75,-4.335
Top Component Outline:
  lines w0.05: -1.95,-4.315 1.95,-4.315 1.95,4.315 -1.95,4.315 -1.95,-4.315
Top Component Terminal:
  lines w0.05: -3,-4.02 -2.165,-4.02 -2.165,-3.6 -3,-3.6 -3,-4.02 ; -3,-2.75 -2.165,-2.75 -2.165,-2.33 -3,-2.33 -3,-2.75 ; -3,-1.48 -2.165,-1.48 -2.165,-1.06 -3,-1.06 -3,-1.48 ; -3,-0.21 -2.165,-0.21 -2.165,0.21 -3,0.21 -3,-0.21 ; -3,1.06 -2.165,1.06 -2.165,1.48 -3,1.48 -3,1.06 ; -3,2.33 -2.165,2.33 -2.165,2.75 -3,2.75 -3,2.33 ; -3,3.6 -2.165,3.6 -2.165,4.02 -3,4.02 -3,3.6 ; 2.165,-4.02 2.165,-3.6 3,-3.6 3,-4.02 2.165,-4.02 ; 2.165,-2.75 2.165,-2.33 3,-2.33 3,-2.75 2.165,-2.75 ; 2.165,-1.48 2.165,-1.06 3,-1.06 3,-1.48 2.165,-1.48 ; 2.165,-0.21 2.165,0.21 3,0.21 3,-0.21 2.165,-0.21 ; 2.165,1.06 2.165,1.48 3,1.48 3,1.06 2.165,1.06 ; 2.165,2.33 2.165,2.75 3,2.75 3,2.33 2.165,2.33 ; 2.165,3.6 2.165,4.02 3,4.02 3,3.6 2.165,3.6
3D body "SOIC14P127_865X600X175L70X42.STEP": height 1.75, standoff 0, extent -3,-4.325 3,4.325